# EAGLE library part PCT2075 (library madhu)
The PCT2075 is a temperature-to-digital converter featuring +/-1 C accuracy over -55 C to +100 C range. It uses an on-chip band gap temperature sensor and Sigma-Delta A-to-D conversion technique with an overtemperature detection output that is a drop-in replacement for other LM75 series thermal sensors.
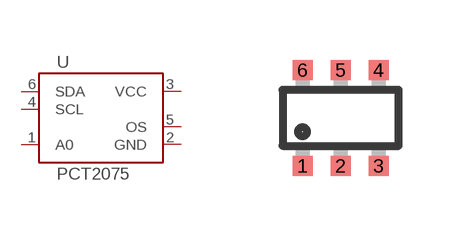
[diagram p26: symbol with the pads of SC74; footprint SC74]

Designator prefix U

## PCT2075GVX  [SC74]
1  A0  in
2  GND  pwr
3  VCC  pwr
4  SCL  in
5  OS  oc
6  SDA

## Footprint SC74 (pad centres in mm)
Small Outline Transistor; 6 leads Reflow soldering INFINEON, www.infineon.com/cmc_upload/0/000/010/257/eh_db_5b.pdf
smd 0.5 x 0.5: 1 -0.95,-1.2; 2 0,-1.2; 3 0.95,-1.2; 4 0.95,1.2; 5 0,1.2; 6 -0.95,1.2